# Altium footprint library IndoorGuide_Anchor_Device_V1.0.0.PcbLib: 2 footprints
Each footprint in its own frame and in the unit in brackets; x right, y up, seen from the top. Pads: shape width x height; smd on the part's side, far side on the other; paste and mask are expansions set on the pad; w line width, h text height; cw(c..) or ccw(c..) is an arc to the next point about the centre after c.
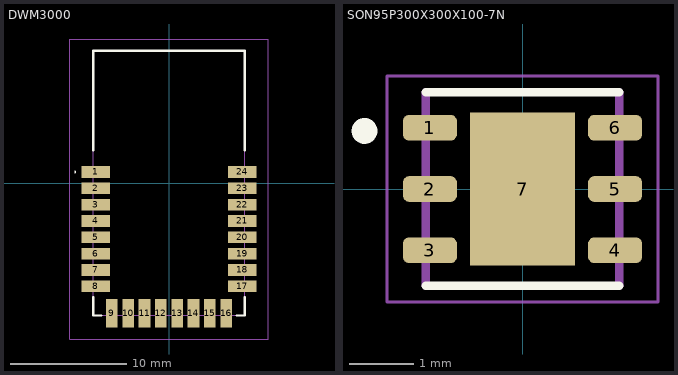
[diagram p0: the footprints below, top view; thin cyan lines are the x and y axes]

## DWM3000 [mm]
pads (24):
  rect 2.45x1 smd: 1(-6.295,0.95) 2(-6.295,-0.45) 3(-6.295,-1.85) 4(-6.295,-3.25) 5(-6.295,-4.65) 6(-6.295,-6.05) 7(-6.295,-7.45) 8(-6.295,-8.85) 17(6.295,-8.85) 18(6.295,-7.45) 19(6.295,-6.05) 20(6.295,-4.65) 21(6.295,-3.25) 22(6.295,-1.85) 23(6.295,-0.45) 24(6.295,0.95)
  rect 1x2.45 smd: 9(-4.9,-11.145) 10(-3.5,-11.145) 11(-2.1,-11.145) 12(-0.7,-11.145) 13(0.7,-11.145) 14(2.1,-11.145) 15(3.5,-11.145) 16(4.9,-11.145)
Top Overlay:
  lines w0.1: -8.1,0.95 ccw(c-8.05,0.95) -8,0.95 ccw(c-8.05,0.95) -8.1,0.95
  lines w0.2: -6.5,-9.8 -6.5,-11.35 -5.8,-11.35 ; -6.5,2.8 -6.5,11.35 6.5,11.35 6.5,2.8 ; 5.8,-11.35 6.5,-11.35 6.5,-9.8
Mechanical 15:
  lines w0.1: -6.5,-11.35 -6.5,11.35 6.5,11.35 6.5,-11.35 -6.5,-11.35
Mechanical 20:
  lines w0.1: -8.52,-13.37 -8.52,12.35 8.52,12.35 8.52,-13.37 -8.52,-13.37

## SON95P300X300X100-7N [mm]
pads (7):
  rrect50% 0.84x0.4 smd: 1(-1.435,0.95) 2(-1.435,0) 3(-1.435,-0.95) 4(1.435,-0.95) 5(1.435,0) 6(1.435,0.95)
  rect 1.625x2.365 smd paste-2: 7(0,0)
Top Overlay:
  circle w0.2: c-2.45,0.9 r0.1
  lines w0.127: -1.5,-1.5 1.5,-1.5 ; -1.5,1.5 1.5,1.5
Top Paste:
  region: 0.57,-0.83 -0.57,-0.83 -0.57,0.83 0.57,0.83
Mechanical 13:
  lines w0.127: -1.5,-1.5 -1.5,1.5 ; 1.5,-1.5 1.5,1.5
Mechanical 15:
  lines w0.05: -2.1,-1.75 -2.1,1.75 2.1,1.75 2.1,-1.75 -2.1,-1.75
3D body "step_temp.STEP": height 0.54, standoff -0.46, extent -1.5,-1.5 1.5,1.5